# Altium footprint library Circuit_protection.PcbLib: 33 footprints (part 3 of 3)
Each footprint in its own frame and in the unit in brackets; x right, y up, seen from the top. Pads: shape width x height; smd on the part's side, far side on the other; paste and mask are expansions set on the pad; w line width, h text height; cw(c..) or ccw(c..) is an arc to the next point about the centre after c.
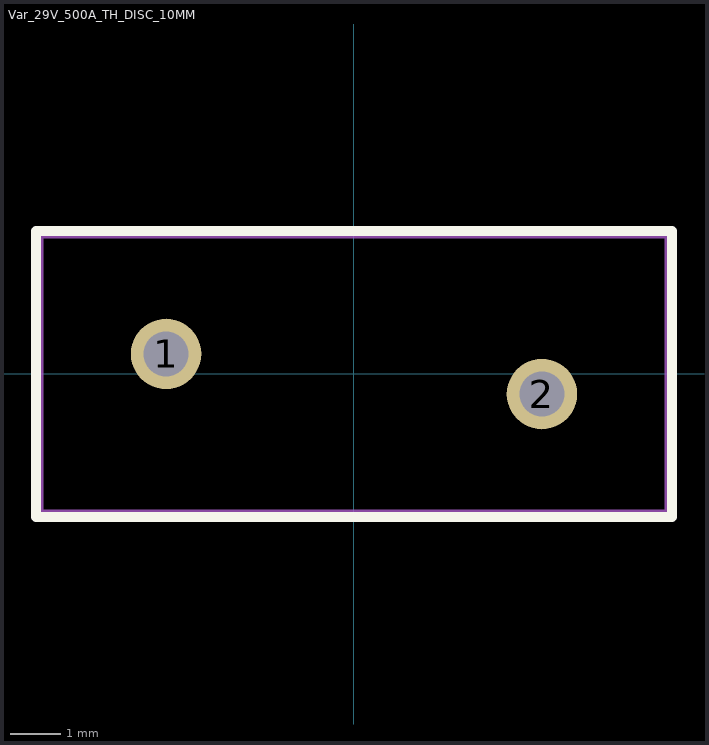
[diagram p2: the footprint, top view; thin cyan lines are the x and y axes]

## Var_29V_500A_TH_DISC_10MM [mm] "/20261022/"
pads (2):
  round 1.408 hole 0.9 mask+0.102: 1(-3.749,0.393) 2(3.751,-0.407)
Top Overlay:
  lines w0.2: -6.349,-2.857 -6.349,2.843 6.351,2.843 6.351,-2.857 -6.349,-2.857
Mechanical 2 (Mech13):
  lines w0.1: -6.249,-2.757 6.251,-2.757 6.251,2.743 -6.249,2.743 -6.249,-2.757
3D body "Download_STP_WE-VD_820513001+(rev1).stp": height 13.5, standoff -22.5, extent -5.486,-1.925 5.505,1.925